# Altium footprint library 2020-12-12_20-07-00.PcbLib: 3 footprints
Each footprint in its own frame and in the unit in brackets; x right, y up, seen from the top. Pads: shape width x height; smd on the part's side, far side on the other; paste and mask are expansions set on the pad; w line width, h text height; cw(c..) or ccw(c..) is an arc to the next point about the centre after c.
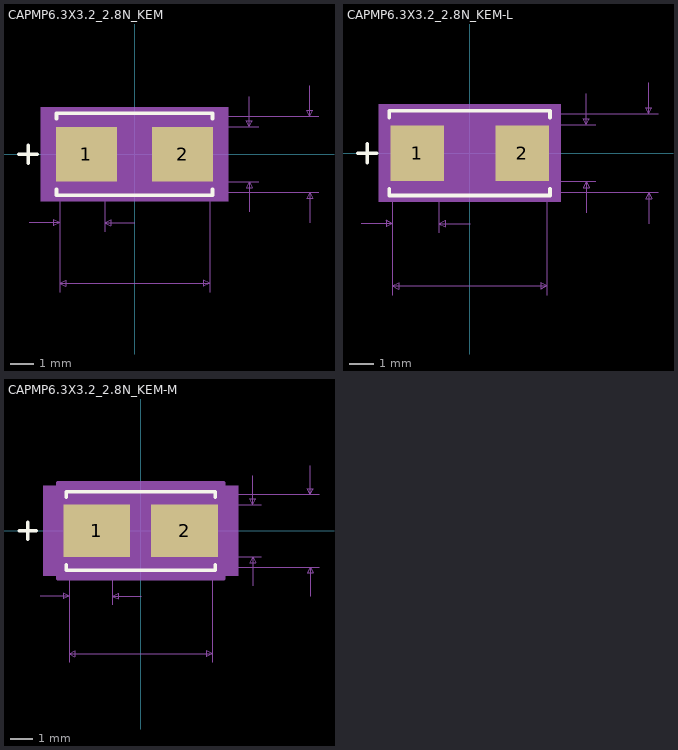
[diagram p0: the footprints below, top view; thin cyan lines are the x and y axes]

## CAPMP6.3X3.2_2.8N_KEM [mm]
pads (2):
  rect 2.56x2.3 smd paste+0 mask+0: 1(-2.022,0) 2(2.022,0)
Top Overlay:
  lines w0.152: -4.851,0 -4.089,0 ; -4.47,-0.381 -4.47,0.381 ; -3.277,-1.483 -3.277,-1.727 3.277,-1.727 3.277,-1.483 ; -3.277,1.483 -3.277,1.727 3.277,1.727 3.277,1.483
Mechanical 5:
  region: 3.937,-1.981 -3.937,-1.981 -3.937,1.981 3.937,1.981
Mechanical 7:
  lines w0.025: -4.42,-2.87 -3.15,-2.87 ; -3.15,-5.791 -3.15,0 -3.15,-3.251 ; -1.25,-3.251 -1.25,0 ; 0.02,-2.87 -1.25,-2.87 ; 3.15,-5.791 3.15,0 ; 3.556,-1.6 7.747,-1.6 ; 3.556,-1.15 5.207,-1.15 ; 3.556,1.15 5.207,1.15 ; 3.556,1.6 7.747,1.6 ; 4.826,-2.42 4.826,-1.15 ; 4.826,2.42 4.826,1.15 ; 7.366,-2.87 7.366,-1.6 ; 7.366,2.87 7.366,1.6 ; -3.15,-5.41 3.15,-5.41 ; -3.15,-5.41 -2.896,-5.283 -2.896,-5.537 -3.15,-5.41 ; -3.15,-2.87 -3.404,-2.743 -3.404,-2.997 -3.15,-2.87 ; -1.25,-2.87 -0.996,-2.743 -0.996,-2.997 -1.25,-2.87 ; 3.15,-5.41 2.896,-5.283 2.896,-5.537 3.15,-5.41 ; 4.826,-1.15 4.699,-1.404 4.953,-1.404 4.826,-1.15 ; 4.826,1.15 4.699,1.404 4.953,1.404 4.826,1.15 ; 7.366,-1.6 7.239,-1.854 7.493,-1.854 7.366,-1.6 ; 7.366,1.6 7.239,1.854 7.493,1.854 7.366,1.6
  text "Default Padstyle: RX100p8Y90p55D0T" at -10.795,-8.585 h1.27
  text "Alt 1 Padstyle: OX60Y90D30P" at -8.572,-10.49 h1.27
  text "Alt 2 Padstyle: OX90Y60D30P" at -8.572,-12.395 h1.27
  text "0.091in/2.3mm" at 5.334,-0.318 h0.64
  text "0.126in/3.2mm" at 7.874,-0.318 h0.64
  text "0.248in/6.3mm" at -2.064,-6.553 h0.64
  text "0.063in/1.6mm" at -4.264,-4.013 h0.64
Mechanical 13:
  lines w0.025: -4.851,0 -4.089,0 ; -4.47,-0.381 -4.47,0.381 ; -3.15,-1.6 3.15,-1.6 3.15,1.6 -3.15,1.6 -3.15,-1.6
Mechanical 15:
  region: -3.404,-1.404 -3.556,-1.404 -3.556,1.404 -3.404,1.404 -3.404,1.854 3.404,1.854 3.404,1.404 3.556,1.404 3.556,-1.404 3.404,-1.404 3.404,-1.854 -3.404,-1.854
  lines w0.152: -3.556,-1.404 -3.556,1.404 -3.404,1.404 -3.404,1.854 3.404,1.854 3.404,1.404 3.556,1.404 3.556,-1.404 3.404,-1.404 3.404,-1.854 -3.404,-1.854 -3.404,-1.404 -3.556,-1.404
3D body: height 0.25, standoff 0, extent 0,0 0.254,0.254

## CAPMP6.3X3.2_2.8N_KEM-L [mm]
pads (2):
  rect 2.179x2.249 smd paste+0 mask+0: 1(-2.136,0) 2(2.136,0)
Top Overlay:
  lines w0.152: -4.546,0 -3.784,0 ; -4.165,-0.381 -4.165,0.381 ; -3.277,-1.453 -3.277,-1.727 3.277,-1.727 3.277,-1.453 ; -3.277,1.453 -3.277,1.727 3.277,1.727 3.277,1.453
Mechanical 5:
  region: 3.709,-1.981 -3.709,-1.981 -3.709,1.981 3.709,1.981
Mechanical 7:
  lines w0.025: -4.42,-2.87 -3.15,-2.87 ; -3.15,-5.791 -3.15,0 -3.15,-3.251 ; -1.25,-3.251 -1.25,0 ; 0.02,-2.87 -1.25,-2.87 ; 3.15,-5.791 3.15,0 ; 3.48,-1.6 7.671,-1.6 ; 3.48,-1.15 5.131,-1.15 ; 3.48,1.15 5.131,1.15 ; 3.48,1.6 7.671,1.6 ; 4.75,-2.42 4.75,-1.15 ; 4.75,2.42 4.75,1.15 ; 7.29,-2.87 7.29,-1.6 ; 7.29,2.87 7.29,1.6 ; -3.15,-5.41 3.15,-5.41 ; -3.15,-5.41 -2.896,-5.283 -2.896,-5.537 -3.15,-5.41 ; -3.15,-2.87 -3.404,-2.743 -3.404,-2.997 -3.15,-2.87 ; -1.25,-2.87 -0.996,-2.743 -0.996,-2.997 -1.25,-2.87 ; 3.15,-5.41 2.896,-5.283 2.896,-5.537 3.15,-5.41 ; 4.75,-1.15 4.623,-1.404 4.877,-1.404 4.75,-1.15 ; 4.75,1.15 4.623,1.404 4.877,1.404 4.75,1.15 ; 7.29,-1.6 7.163,-1.854 7.417,-1.854 7.29,-1.6 ; 7.29,1.6 7.163,1.854 7.417,1.854 7.29,1.6
  text "Default Padstyle: RX85p8Y88p55D0T" at -10.477,-8.585 h1.27
  text "Alt 1 Padstyle: OX60Y90D30P" at -8.572,-10.49 h1.27
  text "Alt 2 Padstyle: OX90Y60D30P" at -8.572,-12.395 h1.27
  text "0.091in/2.3mm" at 5.258,-0.318 h0.64
  text "0.126in/3.2mm" at 7.798,-0.318 h0.64
  text "0.248in/6.3mm" at -2.064,-6.553 h0.64
  text "0.063in/1.6mm" at -4.264,-4.013 h0.64
Mechanical 13:
  lines w0.025: -4.546,0 -3.784,0 ; -4.165,-0.381 -4.165,0.381 ; -3.15,-1.6 3.15,-1.6 3.15,1.6 -3.15,1.6 -3.15,-1.6
Mechanical 15:
  region: -3.252,-1.226 -3.328,-1.226 -3.328,1.226 -3.252,1.226 -3.252,1.702 3.252,1.702 3.252,1.226 3.328,1.226 3.328,-1.226 3.252,-1.226 3.252,-1.702 -3.252,-1.702
  lines w0.152: -3.328,-1.226 -3.328,1.226 -3.252,1.226 -3.252,1.702 3.252,1.702 3.252,1.226 3.328,1.226 3.328,-1.226 3.252,-1.226 3.252,-1.702 -3.252,-1.702 -3.252,-1.226 -3.328,-1.226
3D body: height 0.25, standoff 0, extent 0,0 0.254,0.254

## CAPMP6.3X3.2_2.8N_KEM-M [mm]
pads (2):
  rect 2.941x2.3 smd paste+0 mask+0: 1(-1.933,0) 2(1.933,0)
Top Overlay:
  lines w0.152: -5.359,0 -4.597,0 ; -4.978,-0.381 -4.978,0.381 ; -3.277,-1.483 -3.277,-1.727 3.277,-1.727 3.277,-1.483 ; -3.277,1.483 -3.277,1.727 3.277,1.727 3.277,1.483
Mechanical 5:
  region: 4.293,-1.981 -4.293,-1.981 -4.293,1.981 4.293,1.981
Mechanical 7:
  lines w0.025: -4.42,-2.87 -3.15,-2.87 ; -3.15,-5.791 -3.15,0 -3.15,-3.251 ; -1.25,-3.251 -1.25,0 ; 0.02,-2.87 -1.25,-2.87 ; 3.15,-5.791 3.15,0 ; 3.658,-1.6 7.849,-1.6 ; 3.658,-1.15 5.309,-1.15 ; 3.658,1.15 5.309,1.15 ; 3.658,1.6 7.849,1.6 ; 4.928,-2.42 4.928,-1.15 ; 4.928,2.42 4.928,1.15 ; 7.468,-2.87 7.468,-1.6 ; 7.468,2.87 7.468,1.6 ; -3.15,-5.41 3.15,-5.41 ; -3.15,-5.41 -2.896,-5.283 -2.896,-5.537 -3.15,-5.41 ; -3.15,-2.87 -3.404,-2.743 -3.404,-2.997 -3.15,-2.87 ; -1.25,-2.87 -0.996,-2.743 -0.996,-2.997 -1.25,-2.87 ; 3.15,-5.41 2.896,-5.283 2.896,-5.537 3.15,-5.41 ; 4.928,-1.15 4.801,-1.404 5.055,-1.404 4.928,-1.15 ; 4.928,1.15 4.801,1.404 5.055,1.404 4.928,1.15 ; 7.468,-1.6 7.341,-1.854 7.595,-1.854 7.468,-1.6 ; 7.468,1.6 7.341,1.854 7.595,1.854 7.468,1.6
  text "Default Padstyle: RX115p8Y90p55D0T" at -10.795,-8.585 h1.27
  text "Alt 1 Padstyle: OX60Y90D30P" at -8.572,-10.49 h1.27
  text "Alt 2 Padstyle: OX90Y60D30P" at -8.572,-12.395 h1.27
  text "0.091in/2.3mm" at 5.436,-0.318 h0.64
  text "0.126in/3.2mm" at 7.976,-0.318 h0.64
  text "0.248in/6.3mm" at -2.064,-6.553 h0.64
  text "0.063in/1.6mm" at -4.264,-4.013 h0.64
Mechanical 13:
  lines w0.025: -5.359,0 -4.597,0 ; -4.978,-0.381 -4.978,0.381 ; -3.15,-1.6 3.15,-1.6 3.15,1.6 -3.15,1.6 -3.15,-1.6
Mechanical 15:
  region: -3.658,-1.658 -3.912,-1.658 -3.912,1.658 -3.658,1.658 -3.658,2.108 3.658,2.108 3.658,1.658 3.912,1.658 3.912,-1.658 3.658,-1.658 3.658,-2.108 -3.658,-2.108
  lines w0.152: -3.912,-1.658 -3.912,1.658 -3.658,1.658 -3.658,2.108 3.658,2.108 3.658,1.658 3.912,1.658 3.912,-1.658 3.658,-1.658 3.658,-2.108 -3.658,-2.108 -3.658,-1.658 -3.912,-1.658
3D body: height 0.25, standoff 0, extent 0,0 0.254,0.254